# EAGLE library part 2606-1104 (library 2606-1104)
PCB terminal block; lever; 6 mm; Pin spacing 7.5 mm; 4-pole; Push-in CAGE CLAMP Source: Datasheet <https://www.wago.com/2606-1104>
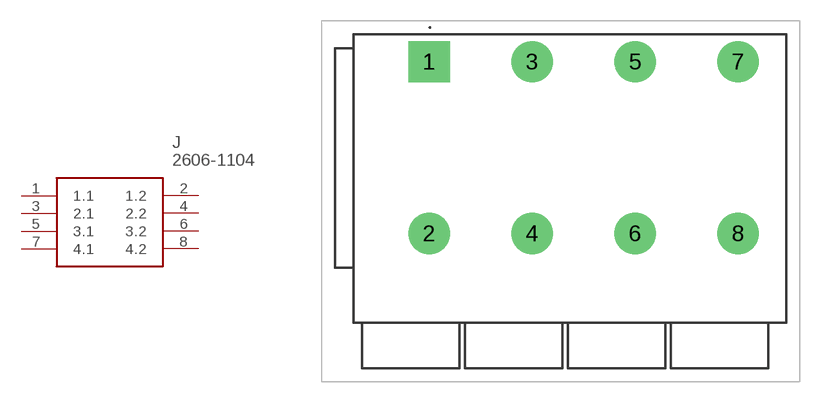
[diagram p0: symbol with the pads of 26061104; footprint 26061104]

Designator prefix J

## 2606-1104 (Description: PCB terminal block; lever; 6 mm; Pin spacing 7.5 mm; 4-pole; Push-in CAGE CLAMP; Height: 24mm; Manufacturer_Name: Wago; Manufacturer_Part_Number: 2606-1104)  [26061104]
1  1.1
2  1.2
3  2.1
4  2.2
5  3.1
6  3.2
7  4.1
8  4.2

## Footprint 26061104 (pad centres in mm)
2606-1104-1
drill 2 pad 3 square: 1 0,0
drill 2 pad 3: 2 0,-12.5; 3 7.5,0; 4 7.5,-12.5; 5 15,0; 6 15,-12.5; 7 22.5,0; 8 22.5,-12.5